# Altium footprint library RPI-Router.PcbLib: 49 footprints (part 2 of 4)
Each footprint in its own frame and in the unit in brackets; x right, y up, seen from the top. Pads: shape width x height; smd on the part's side, far side on the other; paste and mask are expansions set on the pad; w line width, h text height; cw(c..) or ccw(c..) is an arc to the next point about the centre after c.
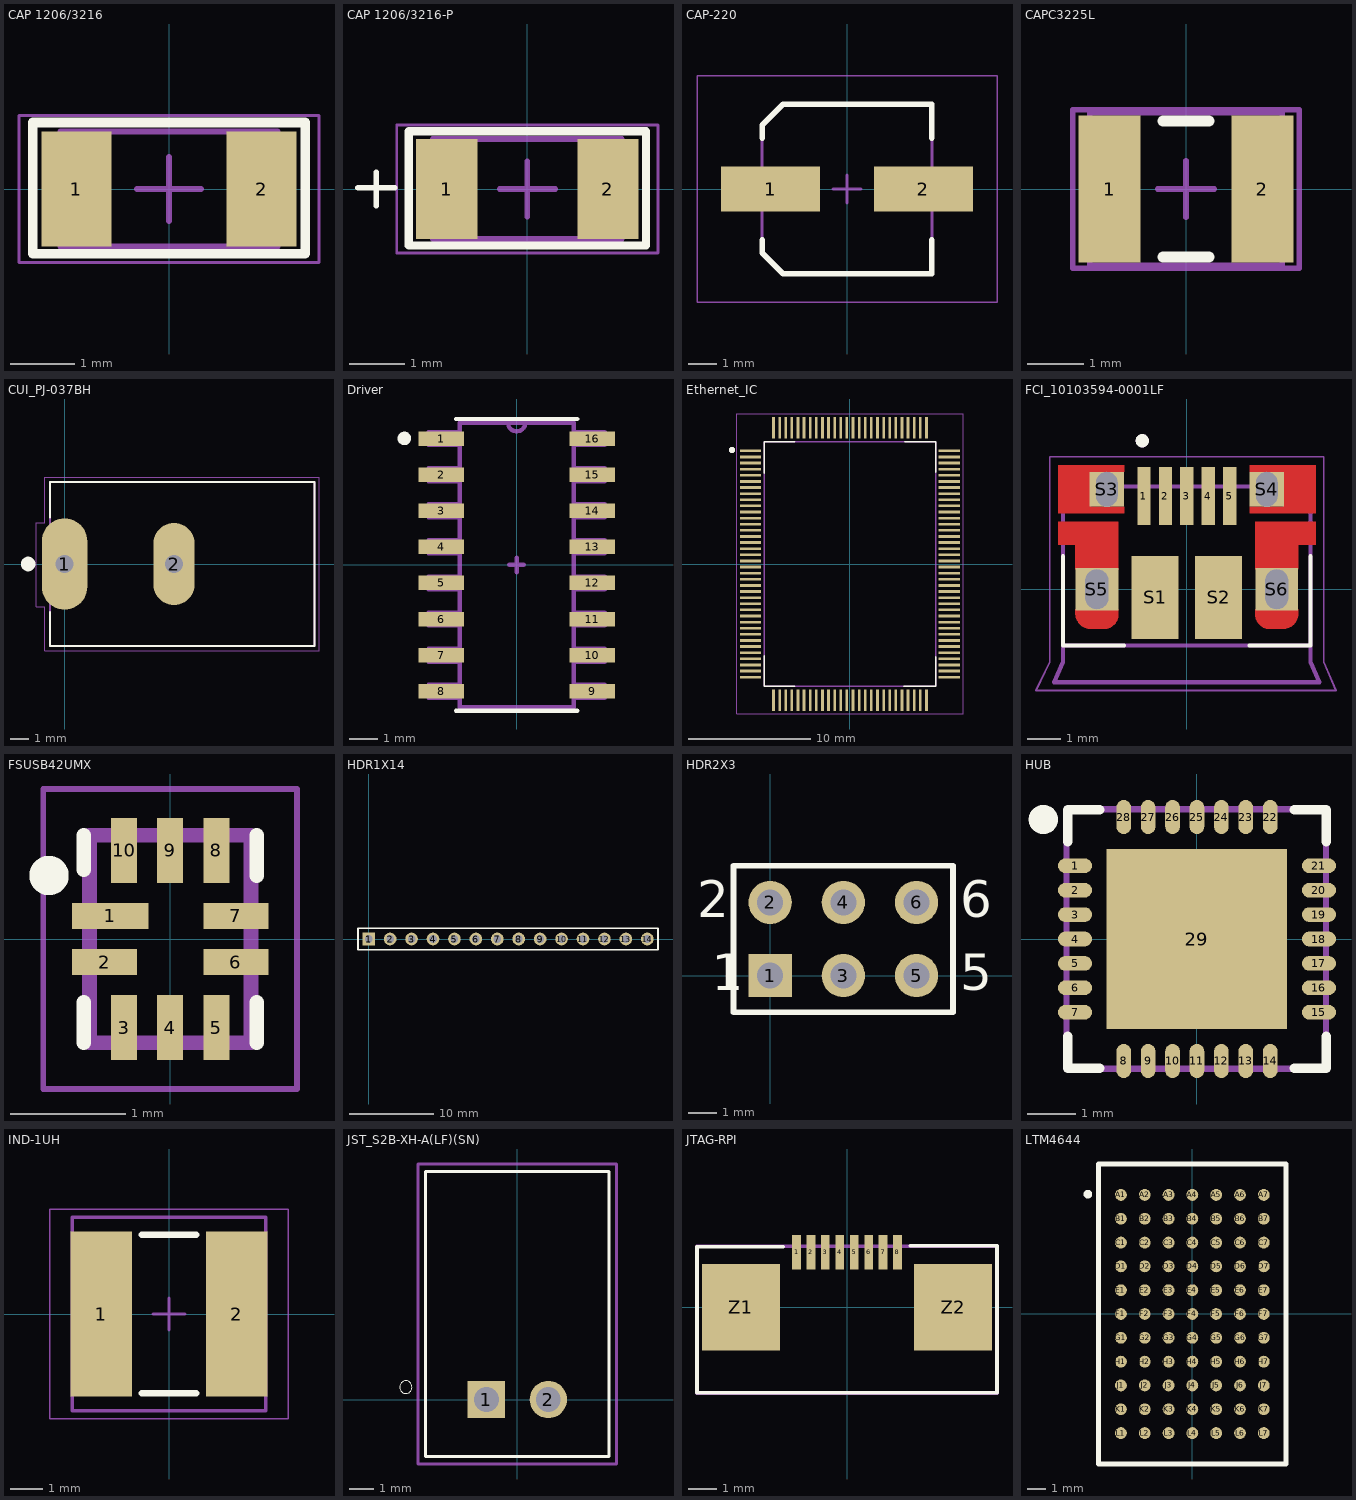
[diagram p1: the footprints below, top view; thin cyan lines are the x and y axes]

## CAP 1206/3216 [mm] "Chip Capacitor, 2-Leads, Body 3.25x1.60mm, IPC Medium Density"
height 0.8
pads (2):
  rect 1.1x1.8 smd: 1(-1.45,0) 2(1.45,0)
Top Overlay:
  lines w0.15: -2.134,-1.016 -2.134,1.041 2.134,1.041 2.134,-1.016 -2.134,-1.016
Mechanical 13:
  lines w0.1: -1.7,-0.9 1.7,-0.9 1.7,0.9 -1.7,0.9 -1.7,-0.9
Mechanical 15:
  lines w0.05: -2.35,-1.15 2.35,-1.15 2.35,1.15 -2.35,1.15 -2.35,-1.15
  lines w0.1: -0.5,0 0.5,0 ; 0,-0.5 0,0.5
3D body "CAP 1206-0.8mm.STEP": height 0.8, standoff 0, extent -1.6,-0.8 1.6,0.8

## CAP 1206/3216-P [mm] "Chip Capacitor, 2-Leads, Body 3.25x1.60mm, IPC Medium Density"
height 0.8
pads (2):
  rect 1.1x1.8 smd: 1(-1.45,0) 2(1.45,0)
Top Overlay:
  lines w0.1: -3.048,0.025 -2.388,0.025 ; -2.718,-0.305 -2.718,0.305
  lines w0.15: -2.134,-1.016 -2.134,1.041 2.134,1.041 2.134,-1.016 -2.134,-1.016
Mechanical 13:
  lines w0.1: -1.7,-0.9 1.7,-0.9 1.7,0.9 -1.7,0.9 -1.7,-0.9
Mechanical 15:
  lines w0.05: -2.35,-1.15 2.35,-1.15 2.35,1.15 -2.35,1.15 -2.35,-1.15
  lines w0.1: -0.5,0 0.5,0 ; 0,-0.5 0,0.5
3D body "CAP 1206-0.8mm.STEP": height 0.8, standoff 0, extent -1.6,-0.8 1.6,0.8

## CAP-220 [mm] "Aluminum Electrolytic Capacitor, Body 6.00x6.00x8.20mm, IPC Low Density"
height 8.2
pads (2):
  rect 3.5x1.6 smd: 1(-2.7,0) 2(2.7,0)
Top Overlay:
  lines w0.2: -3,-1.8 -3,-2.25 -2.25,-3 3,-3 3,-1.8 ; -3,1.8 -3,2.25 -2.25,3 3,3 3,1.8
Mechanical 13:
  lines w0.1: -3,-2.25 -2.25,-3 3,-3 3,3 -2.25,3 -3,2.25 -3,-2.25
Mechanical 15:
  lines w0.05: -5.3,-4 -5.3,4 5.3,4 5.3,-4 -5.3,-4
  lines w0.1: -0.5,0 0.5,0 ; 0,-0.5 0,0.5
3D body: height 2.74, standoff 0, extent -3,-3 3,3
3D body: height 8.2, standoff 0, extent -3.15,-3.15 3.15,3.144

## CAPC3225L [mm] "Chip Capacitor, Body 3.2x2.5mm, IPC High Density"
height 1.35
pads (2):
  rect 1.1x2.6 smd: 1(-1.35,0) 2(1.35,0)
Top Overlay:
  lines w0.2: -0.4,-1.2 0.4,-1.2 ; -0.4,1.2 0.4,1.2
Mechanical 13:
  lines w0.1: -1.7,-1.35 1.7,-1.35 1.7,1.35 -1.7,1.35 -1.7,-1.35
Mechanical 15:
  lines w0.1: -0.5,0 0.5,0 ; 0,-0.5 0,0.5 ; -2,-1.4 2,-1.4 2,1.4 -2,1.4 -2,-1.4
3D body: height 1.35, standoff 0, extent -1.7,-1.35 1.7,1.35

## CUI_PJ-037BH [mm]
pads (2):
  oval 2.5x5 hole 1 square: 1(0,0)
  oval 2.25x4.5 hole 1 square: 2(6,0)
Top Overlay:
  circle w0.4: c-2,0 r0.2
  lines w0.127: -0.8,-2.65 -0.8,-4.5 13.7,-4.5 13.7,4.5 -0.8,4.5 -0.8,2.55
Mechanical 13:
  lines w0.127: -0.8,-4.5 -0.8,4.5 13.7,4.5 13.7,-4.5 -0.8,-4.5
Mechanical 15:
  lines w0.05: -1.55,-2.35 -1.1,-2.35 -1.1,-4.75 13.95,-4.75 13.95,4.75 -1.1,4.75 -1.1,2.25 -1.55,2.25 -1.55,-2.35

## Driver [mil]
pads (16):
  rect 63x20 smd: 1(-104.5,175) 2(-104.5,125) 3(-104.5,75) 4(-104.5,25) 5(-104.5,-25) 6(-104.5,-75) 7(-104.5,-125) 8(-104.5,-175) 9(104.5,-175) 10(104.5,-125) 11(104.5,-75) 12(104.5,-25) 13(104.5,25) 14(104.5,75) 15(104.5,125) 16(104.5,175)
Top Overlay:
  circle w10: c-155.51,175.2 r4.4
  lines w6: -84,-202 84,-202 ; -84,202 84,202
Mechanical 13:
  lines w6: -122,-184 -79,-184 ; -122,-184 -122,-166 ; -122,-184 -79,-184 ; -122,-184 -122,-166 ; -122,-166 -79,-166 ; -122,-166 -79,-166 ; -122,-134 -79,-134 ; -122,-134 -122,-116 ; -122,-134 -79,-134 ; -122,-134 -122,-116 ; -122,-116 -79,-116 ; -122,-116 -79,-116 ; -122,-84 -79,-84 ; -122,-84 -122,-66 ; -122,-84 -79,-84 ; -122,-84 -122,-66 ; -122,-66 -79,-66 ; -122,-66 -79,-66 ; -122,-34 -79,-34 ; -122,-34 -122,-16 ; -122,-34 -79,-34 ; -122,-34 -122,-16 ; -122,-16 -79,-16 ; -122,-16 -79,-16 ; -122,16 -79,16 ; -122,16 -122,34 ; -122,16 -79,16 ; -122,16 -122,34 ; -122,34 -79,34 ; -122,34 -79,34 ; -122,66 -79,66 ; -122,66 -122,84 ; -122,66 -79,66 ; -122,66 -122,84 ; -122,84 -79,84 ; -122,84 -79,84 ; -122,116 -79,116 ; -122,116 -122,134 ; -122,116 -79,116 ; -122,116 -122,134 ; -122,134 -79,134 ; -122,134 -79,134 ; -122,166 -79,166 ; -122,166 -122,184 ; -122,166 -79,166 ; -122,166 -122,184 ; -122,184 -79,184 ; -122,184 -79,184 ; -79,-197 -79,197 ; -79,-197 79,-197 ; -79,-197 -79,197 ; -79,-197 79,-197 ; -79,-184 -79,-166 ; -79,-184 -79,-166 ; -79,-134 -79,-116 ; -79,-134 -79,-116 ; -79,-84 -79,-66 ; -79,-84 -79,-66 ; -79,-34 -79,-16 ; -79,-34 -79,-16 ; -79,16 -79,34 ; -79,16 -79,34 ; -79,66 -79,84 ; -79,66 -79,84 ; -79,116 -79,134 ; -79,116 -79,134 ; -79,166 -79,184 ; -79,166 -79,184 ; -79,197 -12,197 ; -79,197 -12,197 ; -12,197 ccw(c0,197) 12,197 ; -12,197 ccw(c0,197) 12,197 ; -12,197 12,197 ; -12,197 12,197 ; 12,197 79,197 ; 12,197 79,197 ; 79,-197 79,197 ; 79,-197 79,197 ; 79,-184 122,-184 ; 79,-184 79,-166 ; 79,-184 122,-184 ; 79,-184 79,-166 ; 79,-166 122,-166 ; 79,-166 122,-166 ; 79,-134 122,-134 ; 79,-134 79,-116 ; 79,-134 122,-134 ; 79,-134 79,-116 ; 79,-116 122,-116 ; 79,-116 122,-116 ; 79,-84 122,-84 ; 79,-84 79,-66 ; 79,-84 122,-84 ; 79,-84 79,-66 ; 79,-66 122,-66 ; 79,-66 122,-66 ; 79,-34 122,-34 ; 79,-34 79,-16 ; 79,-34 122,-34 ; 79,-34 79,-16 ; 79,-16 122,-16 ; 79,-16 122,-16 ; 79,16 122,16 ; 79,16 79,34 ; 79,16 122,16 ; 79,16 79,34 ; 79,34 122,34 ; 79,34 122,34 ; 79,66 122,66 ; 79,66 79,84 ; 79,66 122,66 ; 79,66 79,84 ; 79,84 122,84 ; 79,84 122,84 ; 79,116 122,116 ; 79,116 79,134 ; 79,116 122,116 ; 79,116 79,134 ; 79,134 122,134 ; 79,134 122,134 ; 79,166 122,166 ; 79,166 79,184 ; 79,166 122,166 ; 79,166 79,184 ; 79,184 122,184 ; 79,184 122,184 ; 122,-184 122,-166 ; 122,-184 122,-166 ; 122,-134 122,-116 ; 122,-134 122,-116 ; 122,-84 122,-66 ; 122,-84 122,-66 ; 122,-34 122,-16 ; 122,-34 122,-16 ; 122,16 122,34 ; 122,16 122,34 ; 122,66 122,84 ; 122,66 122,84 ; 122,116 122,134 ; 122,116 122,134 ; 122,166 122,184 ; 122,166 122,184 ; -10,0 10,0 -10,0 ; 0,-10 0,10 0,-10
3D body: height 39.37, standoff 0, extent -79,-197 79,197

## Ethernet_IC [mm]
pads (128):
  rect 1.75x0.22 smd: 1(-8.13,9.25) 2(-8.13,8.75) 3(-8.13,8.25) 4(-8.13,7.75) 5(-8.13,7.25) 6(-8.13,6.75) 7(-8.13,6.25) 8(-8.13,5.75) 9(-8.13,5.25) 10(-8.13,4.75) 11(-8.13,4.25) 12(-8.13,3.75) 13(-8.13,3.25) 14(-8.13,2.75) 15(-8.13,2.25) 16(-8.13,1.75) 17(-8.13,1.25) 18(-8.13,0.75) 19(-8.13,0.25) 20(-8.13,-0.25) 21(-8.13,-0.75) 22(-8.13,-1.25) 23(-8.13,-1.75) 24(-8.13,-2.25) 25(-8.13,-2.75) 26(-8.13,-3.25) 27(-8.13,-3.75) 28(-8.13,-4.25) 29(-8.13,-4.75) 30(-8.13,-5.25) 31(-8.13,-5.75) 32(-8.13,-6.25) 33(-8.13,-6.75) 34(-8.13,-7.25) 35(-8.13,-7.75) 36(-8.13,-8.25) 37(-8.13,-8.75) 38(-8.13,-9.25) 65(8.13,-9.25) 66(8.13,-8.75) 67(8.13,-8.25) 68(8.13,-7.75) 69(8.13,-7.25) 70(8.13,-6.75) 71(8.13,-6.25) 72(8.13,-5.75) 73(8.13,-5.25) 74(8.13,-4.75) 75(8.13,-4.25) 76(8.13,-3.75) 77(8.13,-3.25) 78(8.13,-2.75) 79(8.13,-2.25) 80(8.13,-1.75) 81(8.13,-1.25) 82(8.13,-0.75) 83(8.13,-0.25) 84(8.13,0.25) 85(8.13,0.75) 86(8.13,1.25) 87(8.13,1.75) 88(8.13,2.25) 89(8.13,2.75) 90(8.13,3.25) 91(8.13,3.75) 92(8.13,4.25) 93(8.13,4.75) 94(8.13,5.25) 95(8.13,5.75) 96(8.13,6.25) 97(8.13,6.75) 98(8.13,7.25) 99(8.13,7.75) 100(8.13,8.25) 101(8.13,8.75) 102(8.13,9.25)
  rect 0.22x1.75 smd: 39(-6.25,-11.13) 40(-5.75,-11.13) 41(-5.25,-11.13) 42(-4.75,-11.13) 43(-4.25,-11.13) 44(-3.75,-11.13) 45(-3.25,-11.13) 46(-2.75,-11.13) 47(-2.25,-11.13) 48(-1.75,-11.13) 49(-1.25,-11.13) 50(-0.75,-11.13) 51(-0.25,-11.13) 52(0.25,-11.13) 53(0.75,-11.13) 54(1.25,-11.13) 55(1.75,-11.13) 56(2.25,-11.13) 57(2.75,-11.13) 58(3.25,-11.13) 59(3.75,-11.13) 60(4.25,-11.13) 61(4.75,-11.13) 62(5.25,-11.13) 63(5.75,-11.13) 64(6.25,-11.13) 103(6.25,11.13) 104(5.75,11.13) 105(5.25,11.13) 106(4.75,11.13) 107(4.25,11.13) 108(3.75,11.13) 109(3.25,11.13) 110(2.75,11.13) 111(2.25,11.13) 112(1.75,11.13) 113(1.25,11.13) 114(0.75,11.13) 115(0.25,11.13) 116(-0.25,11.13) 117(-0.75,11.13) 118(-1.25,11.13) 119(-1.75,11.13) 120(-2.25,11.13) 121(-2.75,11.13) 122(-3.25,11.13) 123(-3.75,11.13) 124(-4.25,11.13) 125(-4.75,11.13) 126(-5.25,11.13) 127(-5.75,11.13) 128(-6.25,11.13)
Top Overlay:
  circle w0.3: c-9.643,9.311 r0.1
  lines w0.127: -7,-7.5 -7,-10 -4.5,-10 ; -7,7.4 -7,10 -4.5,10 ; 4.4,-10 7,-10 7,-7.6 ; 4.5,10 7,10 7,7.5
Mechanical 13:
  circle w0.3: c-9.643,9.311 r0.1
  lines w0.127: -7,-10 7,-10 7,10 -7,10 -7,-10
Mechanical 15:
  lines w0.05: -9.26,-12.26 9.26,-12.26 9.26,12.26 -9.26,12.26 -9.26,-12.26
3D body: height 3.4, standoff 0, extent -7,-10 7,10

## FCI_10103594-0001LF [mm]
pads (11):
  rect 0.4x1.75 smd: 1(-1.3,2.825) 2(-0.65,2.825) 3(0,2.825) 4(0.65,2.825) 5(1.3,2.825)
  rect 1.425x2.5 smd: S1(-0.962,-0.25) S2(0.962,-0.25)
  rect 1.05x1.05 hole 0.65 slot 1.05 at 90 deg mask+0: S3(-2.425,3.03) S4(2.425,3.03)
  rect 1.3x1.3 hole 0.7 slot 1.2 at 90 deg mask+0: S5(-2.725,0) S6(2.725,0)
Top Layer:
  region: -1.9,3.555 -2.9,3.555 -2.9,2.505 -1.9,2.505 -1.9,2.3 -3.9,2.3 -3.9,3.76 -1.9,3.76
  region: 3.9,2.3 1.9,2.3 1.9,2.505 2.9,2.505 2.9,3.555 1.9,3.555 1.9,3.76 3.9,3.76
  region: -2.075,0.6 -3.375,0.6 -3.375,1.35 -3.9,1.35 -3.9,2.05 -2.075,2.05
  region: -2.075,-0.7 -2.072,-0.724 -2.071,-0.747 -2.071,-0.77 -2.072,-0.793 -2.074,-0.816 -2.077,-0.839 -2.082,-0.862 -2.088,-0.884 -2.095,-0.906 -2.103,-0.928 -2.112,-0.949 -2.122,-0.97 -2.134,-0.99 -2.146,-1.01 -2.16,-1.028 -2.174,-1.047 -2.189,-1.064 -2.206,-1.08 -2.223,-1.096 -2.24,-1.111 -2.259,-1.125 -2.278,-1.137 -2.298,-1.149 -2.319,-1.16 -2.34,-1.169 -2.361,-1.178 -2.383,-1.185 -2.406,-1.191 -2.428,-1.196 -2.45,-1.2 -2.95,-1.2 -2.977,-1.197 -3.001,-1.193 -3.025,-1.188 -3.048,-1.181 -3.071,-1.174 -3.094,-1.165 -3.116,-1.155 -3.137,-1.143 -3.158,-1.131 -3.179,-1.118 -3.198,-1.103 -3.217,-1.088 -3.235,-1.071 -3.252,-1.054 -3.268,-1.036 -3.283,-1.017 -3.297,-0.997 -3.31,-0.976 -3.322,-0.955 -3.333,-0.934 -3.343,-0.911 -3.351,-0.889 -3.359,-0.865 -3.365,-0.842 -3.369,-0.818 -3.373,-0.794 -3.375,-0.77 -3.376,-0.746 -3.376,-0.721 -3.375,-0.7 -3.375,-0.6 -2.075,-0.6
  region: 3.9,1.35 3.375,1.35 3.375,0.6 2.075,0.6 2.075,2.05 3.9,2.05
  region: 3.375,-0.7 3.376,-0.721 3.376,-0.746 3.375,-0.77 3.373,-0.794 3.369,-0.818 3.365,-0.842 3.359,-0.865 3.351,-0.889 3.343,-0.911 3.333,-0.934 3.322,-0.955 3.31,-0.976 3.297,-0.997 3.283,-1.017 3.268,-1.036 3.252,-1.054 3.235,-1.071 3.217,-1.088 3.198,-1.103 3.179,-1.118 3.158,-1.131 3.137,-1.143 3.116,-1.155 3.094,-1.165 3.071,-1.174 3.048,-1.181 3.025,-1.188 3.001,-1.193 2.977,-1.197 2.95,-1.2 2.45,-1.2 2.428,-1.196 2.406,-1.191 2.383,-1.185 2.361,-1.178 2.34,-1.169 2.319,-1.16 2.298,-1.149 2.278,-1.137 2.259,-1.125 2.24,-1.111 2.223,-1.096 2.206,-1.08 2.189,-1.064 2.174,-1.047 2.16,-1.028 2.146,-1.01 2.134,-0.99 2.122,-0.97 2.112,-0.949 2.103,-0.928 2.095,-0.906 2.088,-0.884 2.082,-0.862 2.077,-0.839 2.074,-0.816 2.072,-0.793 2.071,-0.77 2.071,-0.747 2.072,-0.724 2.075,-0.7 2.075,-0.6 3.375,-0.6
Top Overlay:
  circle w0.2: c-1.35,4.5 r0.1
  lines w0.127: -3.75,1 -3.75,-1.7 -1.9,-1.7 ; 1.9,-1.7 3.75,-1.7 3.75,1
Top Paste:
  drawing of 8 lines, arcs and shapes, not listed
Top Solder:
  region: -1.95,-0.7 -1.948,-0.731 -1.948,-0.76 -1.949,-0.789 -1.952,-0.817 -1.956,-0.846 -1.962,-0.874 -1.969,-0.902 -1.978,-0.93 -1.988,-0.957 -1.999,-0.983 -2.012,-1.009 -2.027,-1.034 -2.042,-1.059 -2.059,-1.082 -2.077,-1.105 -2.096,-1.127 -2.116,-1.147 -2.138,-1.167 -2.16,-1.185 -2.183,-1.202 -2.207,-1.218 -2.232,-1.233 -2.258,-1.246 -2.284,-1.258 -2.311,-1.269 -2.339,-1.278 -2.366,-1.286 -2.395,-1.292 -2.423,-1.297 -2.45,-1.3 -2.95,-1.3 -2.981,-1.297 -3.01,-1.293 -3.039,-1.287 -3.068,-1.279 -3.096,-1.271 -3.124,-1.26 -3.151,-1.248 -3.177,-1.235 -3.203,-1.221 -3.228,-1.205 -3.252,-1.188 -3.275,-1.169 -3.297,-1.15 -3.318,-1.129 -3.338,-1.107 -3.357,-1.085 -3.374,-1.061 -3.391,-1.036 -3.406,-1.011 -3.419,-0.985 -3.431,-0.958 -3.442,-0.93 -3.452,-0.902 -3.46,-0.874 -3.466,-0.845 -3.471,-0.816 -3.474,-0.787 -3.476,-0.757 -3.476,-0.728 -3.475,-0.7 -3.475,1.25 -4,1.25 -4,2.15 -1.95,2.15
  region: -1.8,2.2 -4,2.2 -4,3.86 -1.8,3.86
  region: 4,2.2 1.8,2.2 1.8,3.86 4,3.86
  region: 4,1.25 3.475,1.25 3.475,-0.7 3.476,-0.728 3.476,-0.757 3.474,-0.787 3.471,-0.816 3.466,-0.845 3.46,-0.874 3.452,-0.902 3.442,-0.93 3.431,-0.958 3.419,-0.985 3.406,-1.011 3.391,-1.036 3.374,-1.061 3.357,-1.085 3.338,-1.107 3.318,-1.129 3.297,-1.15 3.275,-1.169 3.252,-1.188 3.228,-1.205 3.203,-1.221 3.177,-1.235 3.151,-1.248 3.124,-1.26 3.096,-1.271 3.068,-1.279 3.039,-1.287 3.01,-1.293 2.981,-1.297 2.95,-1.3 2.45,-1.3 2.423,-1.297 2.395,-1.292 2.366,-1.286 2.339,-1.278 2.311,-1.269 2.284,-1.258 2.258,-1.246 2.232,-1.233 2.207,-1.218 2.183,-1.202 2.16,-1.185 2.138,-1.167 2.116,-1.147 2.096,-1.127 2.077,-1.105 2.059,-1.082 2.042,-1.059 2.027,-1.034 2.012,-1.009 1.999,-0.983 1.988,-0.957 1.978,-0.93 1.969,-0.902 1.962,-0.874 1.956,-0.846 1.952,-0.817 1.949,-0.789 1.948,-0.76 1.948,-0.731 1.95,-0.7 1.95,2.15 4,2.15
Mechanical 1:
  lines w0: -2.75,2.83 ccw(c-2.425,2.83) -2.1,2.83 -2.1,3.23 ccw(c-2.425,3.23) -2.75,3.23 -2.75,2.83 ; 2.1,2.83 ccw(c2.425,2.83) 2.75,2.83 2.75,3.23 ccw(c2.425,3.23) 2.1,3.23 2.1,2.83
Mechanical 13:
  circle w0.2: c-1.35,4.5 r0.1
  lines w0.127: 3.75,-1.7 -3.75,-1.7 ; -3.75,-1.7 -3.75,3.11 3.75,3.11 3.75,-2.2 4.02,-2.82 -4.02,-2.82 -3.75,-2.2 -3.75,-1.7
Mechanical 15:
  lines w0.05: -4.57,-3.07 4.52,-3.07 4.15,-2.2 4.15,4.01 -4.15,4.01 -4.15,-2.2 -4.57,-3.07
3D body "10103594.stp": height 2.85, standoff -0.75, extent -4.02,-2.777 4.02,3.256

## FSUSB42UMX [mm]
pads (10):
  rect 0.663x0.225 smd: 1(-0.519,0.2)
  rect 0.563x0.225 smd: 2(-0.569,-0.2) 6(0.569,-0.2) 7(0.569,0.2)
  rect 0.225x0.563 smd: 3(-0.4,-0.768) 4(0,-0.768) 5(0.4,-0.768) 8(0.4,0.768) 9(0,0.768) 10(-0.4,0.768)
Top Overlay:
  circle w0.2: c-1.05,0.55 r0.071
  lines w0.127: -0.75,-0.9 -0.75,-0.55 ; -0.75,0.6 -0.75,0.9 ; 0.75,-0.9 0.75,-0.55 ; 0.75,0.55 0.75,0.9
Mechanical 13:
  lines w0.127: -0.7,-0.9 0.7,-0.9 0.7,0.9 -0.7,0.9 -0.7,-0.9
Mechanical 15:
  lines w0.05: -1.1,-1.3 -1.1,1.3 1.1,1.3 1.1,-1.3 -1.1,-1.3
3D body: height 0.7, standoff 0, extent -0.7,-0.9 0.7,0.9

## HDR1X14 [mm] "Connector; Header; 14 Position"
pads (14):
  rect 1.5x1.5 hole 0.9: 1(0,0)
  round 1.5 hole 0.9: 2(2.54,0) 3(5.08,0) 4(7.62,0) 5(10.16,0) 6(12.7,0) 7(15.24,0) 8(17.78,0) 9(20.32,0) 10(22.86,0) 11(25.4,0) 12(27.94,0) 13(30.48,0) 14(33.02,0)
Top Overlay:
  lines w0.2: -1.27,-1.27 -1.27,1.27 0.635,1.27 34.29,1.27 34.29,-1.27 -1.27,-1.27
3D body "_ _ _C141LFBN-RC.STEP": height 8.5, standoff -3.2, extent -1.25,-1.3 34.81,1.24

## HDR2X3 [mm] "Connector; Header; 3x2 Position"
pads (6):
  rect 1.5x1.5 hole 0.9: 1(0,0)
  round 1.5 hole 0.9: 2(0,2.54) 3(2.54,0) 4(2.54,2.54) 5(5.08,0) 6(5.08,2.54)
Top Overlay:
  lines w0.2: 1.482,-1.27 6.35,-1.27 ; 6.35,-1.27 6.35,3.81 -1.27,3.81 -1.27,-1.27 6.35,-1.27
  text "6" at 6.604,2.032 h1.27
  text "5" at 6.604,-0.508 h1.27
  text "2" at -2.54,2.032 h1.27
  text "1" at -2.032,-0.508 h1.27
3D body "c-87227-3-l-3d.stp": height 10.48, standoff -3.06, extent -1.057,-1.188 6.157,3.688

## HUB [mm]
pads (29):
  oval 0.7x0.3 smd: 1(-2.5,1.501) 2(-2.5,1.001) 3(-2.5,0.5) 4(-2.5,0) 5(-2.5,-0.5) 6(-2.5,-1.001) 7(-2.5,-1.501) 15(2.5,-1.501) 16(2.5,-1.001) 17(2.5,-0.5) 18(2.5,0) 19(2.5,0.5) 20(2.5,1.001) 21(2.5,1.501)
  oval 0.3x0.7 smd: 8(-1.501,-2.5) 9(-1.001,-2.5) 10(-0.5,-2.5) 11(0,-2.5) 12(0.5,-2.5) 13(1.001,-2.5) 14(1.501,-2.5) 22(1.501,2.5) 23(1.001,2.5) 24(0.5,2.5) 25(0,2.5) 26(-0.5,2.5) 27(-1.001,2.5) 28(-1.501,2.5)
  rect 3.7x3.7 smd: 29(0,0)
Top Overlay:
  lines w0.2: -2.65,-2 -2.65,-2.65 -2,-2.65 ; -2.65,2 -2.65,2.65 -2,2.65 ; 2,-2.65 2.65,-2.65 2.65,-2 ; 2,2.65 2.65,2.65 2.65,2
  lines w0.3: -3,2.449 cw(c-3.15,2.45) -3,2.451
Mechanical 13:
  lines w0.127: -2.673,-2.66 2.647,-2.66 2.647,2.66 -2.673,2.66 -2.673,-2.66
3D body: height 1, standoff 0, extent -2.673,-2.66 2.647,2.66

## IND-1UH [mm]
height 4.5
pads (2):
  rect 1.9x5.1 smd: 1(-2.1,0) 2(2.1,0)
Top Overlay:
  lines w0.2: -0.85,-2.45 0.85,-2.45 ; -0.85,2.45 0.85,2.45
Mechanical 13:
  lines w0.1: -3,-3 3,-3 3,3 -3,3 -3,-3
Mechanical 15:
  lines w0.05: -3.7,-3.25 3.7,-3.25 3.7,3.25 -3.7,3.25 -3.7,-3.25
  lines w0.1: -0.5,0 0.5,0 ; 0,-0.5 0,0.5
3D body: height 4.5, standoff 0, extent 1.3,-3 3,3
3D body: height 4.5, standoff 0, extent -3,-3 -1.3,3
3D body: height 4.5, standoff 0, extent -1.3,-3 1.3,3

## JST_S2B-XH-A(LF)(SN) [mm]
pads (2):
  rect 1.508x1.508 hole 1: 1(-1.25,0)
  round 1.508 hole 1: 2(1.25,0)
Top Overlay:
  circle w0: c-4.5,0.5 r0.254
  lines w0.127: -3.7,-2.3 3.7,-2.3 3.7,9.2 -3.7,9.2 -3.7,-2.3
Mechanical 15:
  lines w0.127: -4,-2.6 4,-2.6 4,9.5 -4,9.5 -4,-2.6

## JTAG-RPI [mm]
pads (10):
  rect 0.3x1.2 smd: 1(-1.75,1.9) 2(-1.25,1.9) 3(-0.75,1.9) 4(-0.25,1.9) 5(0.25,1.9) 6(0.75,1.9) 7(1.25,1.9) 8(1.75,1.9)
  rect 2.7x3 smd: Z1(-3.68,0) Z2(3.68,0)
Top Overlay:
  lines w0.127: -2.217,2.09 -5.2,2.09 -5.2,1.5 -5.2,-2.972 5.2,-2.972 5.2,1.5 5.2,2.127 2.191,2.127
Mechanical 13:
  lines w0.127: -5.2,-2.978 5.2,-2.978 5.2,2.108 -5.2,2.108 -5.2,-2.978
3D body "68710814522_Download_STP_68710814522_rev1.stp": height 2.05, standoff -0.05, extent -5.2,-2.978 5.2,2.122

## LTM4644 [mm] "FPGA Power"
pads (77):
  round 0.63 smd: A1(-3.81,6.35) A2(-2.54,6.35) A3(-1.27,6.35) A4(0,6.35) A5(1.27,6.35) A6(2.54,6.35) A7(3.81,6.35) B1(-3.81,5.08) B2(-2.54,5.08) B3(-1.27,5.08) B4(0,5.08) B5(1.27,5.08) B6(2.54,5.08) B7(3.81,5.08) C1(-3.81,3.81) C2(-2.54,3.81) C3(-1.27,3.81) C4(0,3.81) C5(1.27,3.81) C6(2.54,3.81) C7(3.81,3.81) D1(-3.81,2.54) D2(-2.54,2.54) D3(-1.27,2.54) D4(0,2.54) D5(1.27,2.54) D6(2.54,2.54) D7(3.81,2.54) E1(-3.81,1.27) E2(-2.54,1.27) E3(-1.27,1.27) E4(0,1.27) E5(1.27,1.27) E6(2.54,1.27) E7(3.81,1.27) F1(-3.81,0) F2(-2.54,0) F3(-1.27,0) F4(0,0) F5(1.27,0) F6(2.54,0) F7(3.81,0) G1(-3.81,-1.27) G2(-2.54,-1.27) G3(-1.27,-1.27) G4(0,-1.27) G5(1.27,-1.27) G6(2.54,-1.27) G7(3.81,-1.27) H1(-3.81,-2.54) H2(-2.54,-2.54) H3(-1.27,-2.54) H4(0,-2.54) H5(1.27,-2.54) H6(2.54,-2.54) H7(3.81,-2.54) J1(-3.81,-3.81) J2(-2.54,-3.81) J3(-1.27,-3.81) J4(0,-3.81) J5(1.27,-3.81) J6(2.54,-3.81) J7(3.81,-3.81) K1(-3.81,-5.08) K2(-2.54,-5.08) K3(-1.27,-5.08) K4(0,-5.08) K5(1.27,-5.08) K6(2.54,-5.08) K7(3.81,-5.08) L1(-3.81,-6.35) L2(-2.54,-6.35) L3(-1.27,-6.35) L4(0,-6.35) L5(1.27,-6.35) L6(2.54,-6.35) L7(3.81,-6.35)
Top Overlay:
  circle w0.254: c-5.575,6.392 r0.106
  lines w0.254: -5,-8 -5,8 5,8 5,-8 -5,-8
3D body: height 5.01, standoff 0, extent -5,-8 5,7.9